# Altium footprint library board.PcbLib: 31 footprints (part 2 of 2)
Each footprint in its own frame and in the unit in brackets; x right, y up, seen from the top. Pads: shape width x height; smd on the part's side, far side on the other; paste and mask are expansions set on the pad; w line width, h text height; cw(c..) or ccw(c..) is an arc to the next point about the centre after c.
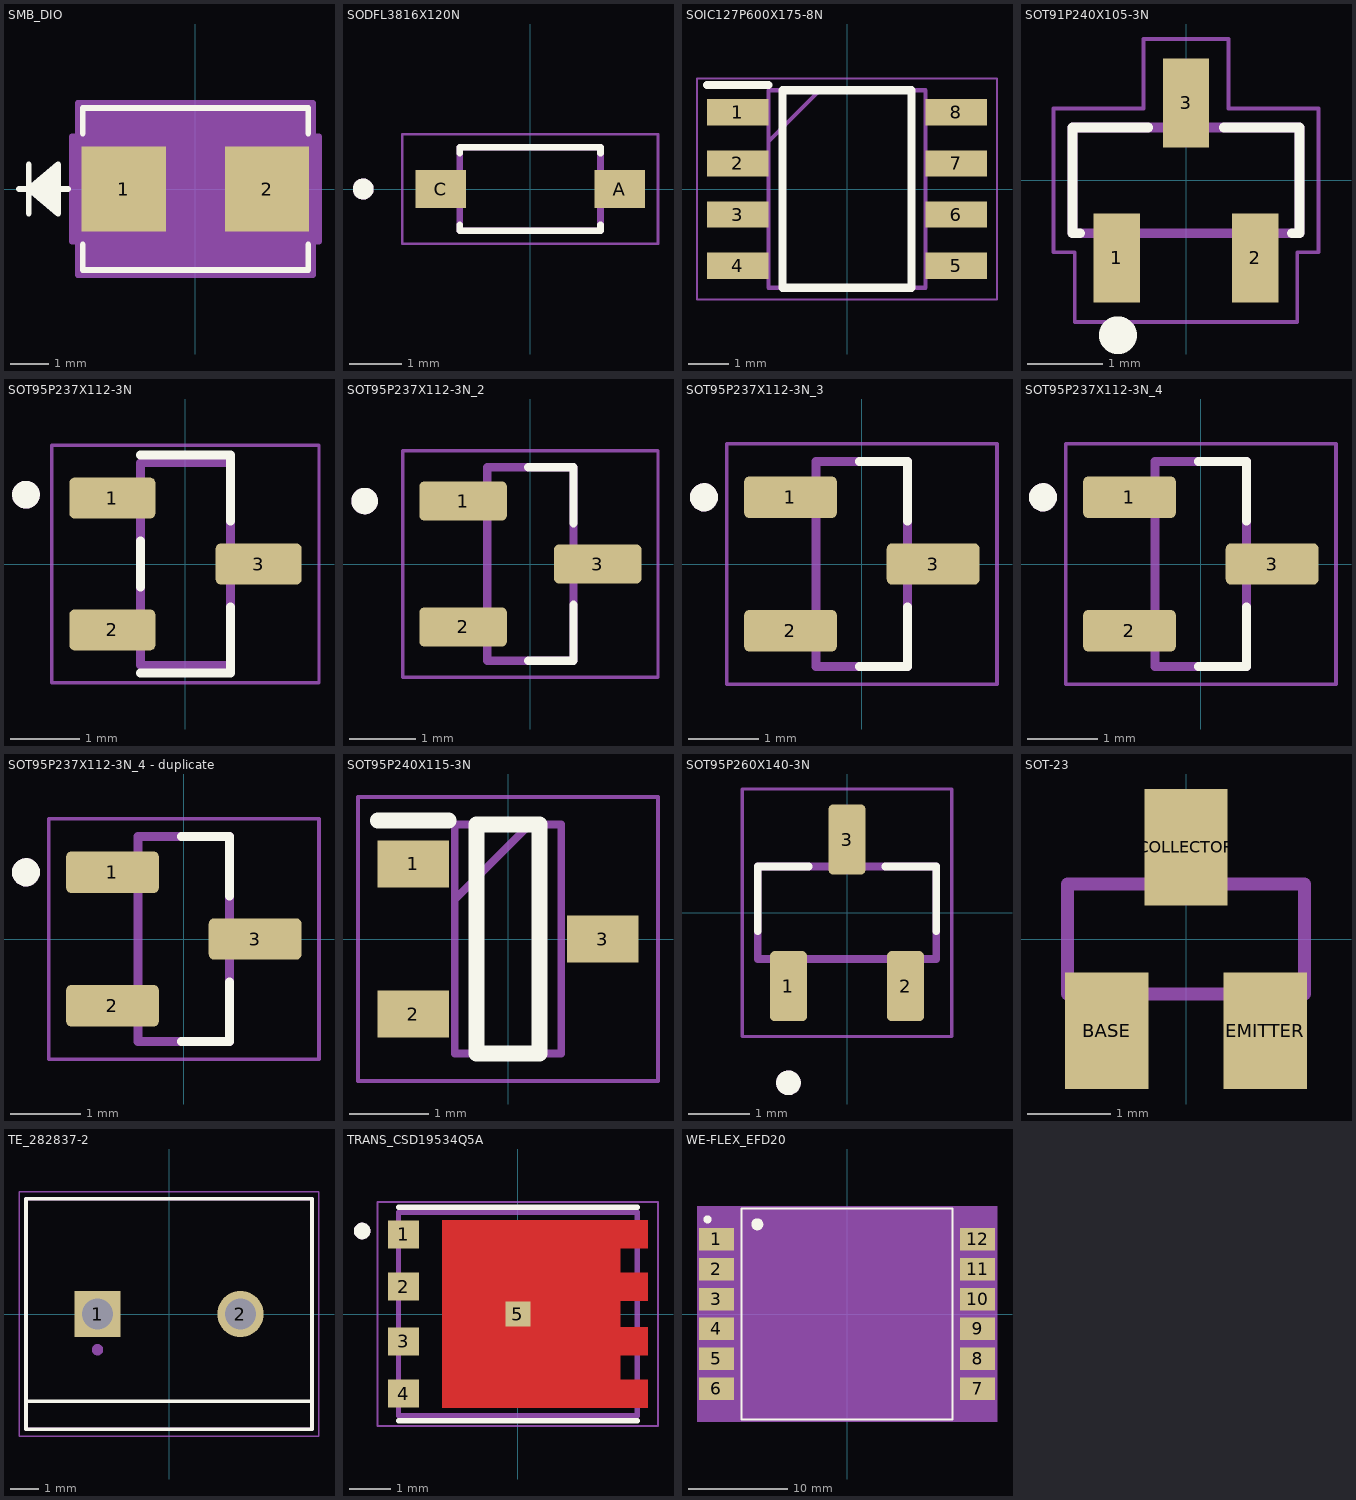
[diagram p1: the footprints below, top view; thin cyan lines are the x and y axes]

## SMB_DIO [mm]
pads (2):
  rect 2.18x2.21 smd paste+0 mask+0: 1(-1.857,0) 2(1.857,0)
Top Overlay:
  lines w0.152: -4.573,0 -3.303,0 ; -4.319,-0.635 -4.319,0.635 ; -3.557,-0.508 -4.319,0 ; -3.557,-0.381 -4.319,0 ; -3.557,-0.254 -4.319,0 ; -3.557,-0.127 -4.319,0 ; -3.557,0.127 -4.319,0 ; -3.557,0.254 -4.319,0 ; -3.557,0.381 -4.319,0 ; -3.557,0.508 -4.319,0 ; -2.922,-1.438 -2.922,-2.097 2.922,-2.097 2.922,-1.438 ; -2.922,1.438 -2.922,2.097 2.922,2.097 2.922,1.438 ; -4.319,0 -3.557,0.635 -3.557,-0.635 -4.319,0
Mechanical 13:
  lines w0.025: -4.573,0 -3.303,0 ; -4.319,-0.635 -4.319,0.635 ; -3.557,-0.508 -4.319,0 ; -3.557,-0.381 -4.319,0 ; -3.557,-0.254 -4.319,0 ; -3.557,-0.127 -4.319,0 ; -3.557,0.127 -4.319,0 ; -3.557,0.254 -4.319,0 ; -3.557,0.381 -4.319,0 ; -3.557,0.508 -4.319,0 ; -4.319,0 -3.557,0.635 -3.557,-0.635 -4.319,0 ; -2.795,-1.97 2.795,-1.97 2.795,1.97 -2.795,1.97 -2.795,-1.97
Mechanical 15:
  region: -3.049,-1.359 -3.201,-1.359 -3.201,1.359 -3.049,1.359 -3.049,2.224 3.049,2.224 3.049,1.359 3.201,1.359 3.201,-1.359 3.049,-1.359 3.049,-2.224 -3.049,-2.224
  lines w0.152: -3.201,-1.359 -3.201,1.359 -3.049,1.359 -3.049,2.224 3.049,2.224 3.049,1.359 3.201,1.359 3.201,-1.359 3.049,-1.359 3.049,-2.224 -3.049,-2.224 -3.049,-1.359 -3.201,-1.359
3D body "SMB_DIO.step": height 2.45, standoff 0, extent -2.795,-1.97 2.795,1.97

## SODFL3816X120N [mm]
height 1.2
pads (2):
  rect 0.97x0.73 smd paste+0 mask+0.102: A(1.72,0) C(-1.72,0)
Top Overlay:
  circle w0.2: c-3.205,0 r0.1
  lines w0.127: -1.35,-0.685 -1.35,-0.8 1.35,-0.8 1.35,-0.685 ; -1.35,0.685 -1.35,0.8 1.35,0.8 1.35,0.685
Mechanical 13:
  circle w0.2: c-3.205,0 r0.1
  lines w0.127: -1.35,-0.8 1.35,-0.8 1.35,0.8 -1.35,0.8 -1.35,-0.8
Mechanical 15:
  lines w0.05: -2.455,-1.05 2.455,-1.05 2.455,1.05 -2.455,1.05 -2.455,-1.05
3D body "step_temp.STEP": height 0.97, standoff -0.03, extent -1.9,-0.762 1.9,0.838

## SOIC127P600X175-8N [mm]
pads (8):
  rect 1.528x0.65 smd: 1(-2.711,1.905) 2(-2.711,0.635) 3(-2.711,-0.635) 4(-2.711,-1.905) 5(2.711,-1.905) 6(2.711,-0.635) 7(2.711,0.635) 8(2.711,1.905)
Top Overlay:
  lines w0.2: -3.475,2.58 -1.948,2.58 ; -1.598,-2.452 1.598,-2.452 1.598,2.452 -1.598,2.452 -1.598,-2.452
Mechanical 15:
  lines w0.1: -1.948,1.182 -0.678,2.452 ; -1.948,-2.452 1.948,-2.452 1.948,2.452 -1.948,2.452 -1.948,-2.452
Mechanical 20:
  lines w0.05: -3.725,-2.75 3.725,-2.75 3.725,2.75 -3.725,2.75 -3.725,-2.75
3D body "UCC28C43QDRQ1.STEP": height 1.75, standoff 0, extent -3.122,-2.452 2.868,2.452

## SOT91P240X105-3N [mm]
pads (3):
  rect 0.61x1.18 smd paste+0 mask+0.102: 1(-0.915,-1.025) 2(0.915,-1.025) 3(0,1.025)
Top Overlay:
  circle w0.4: c-0.9,-2.046 r0.05
  lines w0.127: -1.4,-0.7 -1.5,-0.7 -1.5,0.7 -0.5,0.7 ; 0.5,0.7 1.5,0.7 1.5,-0.7 1.4,-0.7
Mechanical 13:
  lines w0.127: -1.5,-0.7 1.5,-0.7 1.5,0.7 -1.5,0.7 -1.5,-0.7
Mechanical 15:
  lines w0.05: -1.75,-0.95 -1.47,-0.95 -1.47,-1.87 1.47,-1.87 1.47,-0.95 1.75,-0.95 1.75,0.95 0.56,0.95 0.56,1.87 -0.56,1.87 -0.56,0.95 -1.75,0.95 -1.75,-0.95
3D body "step_temp.STEP": height 1.14, standoff 0, extent -1.45,-1.2 1.45,1.2

## SOT95P237X112-3N [mm]
pads (3):
  rrect25% 1.24x0.59 smd paste+0 mask+0.102: 1(-1.055,0.95) 2(-1.055,-0.95) 3(1.055,0)
Top Overlay:
  circle w0.2: c-2.3,1 r0.1
  lines w0.127: -0.65,-1.57 0.65,-1.57 0.65,-0.615 ; -0.65,-0.33 -0.65,0.33 ; -0.65,1.57 0.65,1.57 0.65,0.615
Mechanical 13:
  circle w0.2: c-2.3,1 r0.1
  lines w0.127: -0.65,-1.46 -0.65,1.46 0.65,1.46 0.65,-1.46 -0.65,-1.46
Mechanical 15:
  lines w0.05: -1.925,-1.71 1.925,-1.71 1.925,1.71 -1.925,1.71 -1.925,-1.71
3D body "step_temp.STEP": height 1.12, standoff 0, extent -1.185,-1.46 1.185,1.46

## SOT95P237X112-3N_2 [mm]
pads (3):
  rrect25% 1.32x0.59 smd paste+0 mask+0.102: 1(-1.015,0.95) 2(-1.015,-0.95) 3(1.015,0)
Top Overlay:
  circle w0.2: c-2.5,0.95 r0.1
  lines w0.127: -0.035,-1.46 0.65,-1.46 0.65,-0.615 ; -0.035,1.46 0.65,1.46 0.65,0.615
Mechanical 13:
  circle w0.2: c-2.5,0.95 r0.1
  lines w0.127: -0.65,-1.46 0.65,-1.46 0.65,1.46 -0.65,1.46 -0.65,-1.46
Mechanical 15:
  lines w0.05: -1.925,-1.71 1.925,-1.71 1.925,1.71 -1.925,1.71 -1.925,-1.71
3D body "step_temp.STEP": height 1.15, standoff 0, extent -1.185,-1.46 1.185,1.46

## SOT95P237X112-3N_3 [mm]
pads (3):
  rrect25% 1.32x0.59 smd: 1(-1.015,0.95) 2(-1.015,-0.95) 3(1.015,0)
Top Overlay:
  circle w0.2: c-2.246,0.95 r0.1
  lines w0.127: -0.035,-1.46 0.65,-1.46 0.65,-0.615 ; -0.035,1.46 0.65,1.46 0.65,0.615
Mechanical 13:
  circle w0.2: c-2.246,0.95 r0.1
  lines w0.127: -0.65,-1.46 0.65,-1.46 0.65,1.46 -0.65,1.46 -0.65,-1.46
Mechanical 15:
  lines w0.05: -1.925,-1.71 1.925,-1.71 1.925,1.71 -1.925,1.71 -1.925,-1.71
3D body "step_temp.STEP": height 1.12, standoff 0, extent -1.188,-1.46 1.188,1.46

## SOT95P237X112-3N_4 [mm]
pads (3):
  rrect25% 1.32x0.59 smd: 1(-1.015,0.95) 2(-1.015,-0.95) 3(1.015,0)
Top Overlay:
  circle w0.2: c-2.246,0.95 r0.1
  lines w0.127: -0.035,-1.46 0.65,-1.46 0.65,-0.615 ; -0.035,1.46 0.65,1.46 0.65,0.615
Mechanical 13:
  circle w0.2: c-2.246,0.95 r0.1
  lines w0.127: -0.65,-1.46 0.65,-1.46 0.65,1.46 -0.65,1.46 -0.65,-1.46
Mechanical 15:
  lines w0.05: -1.925,-1.71 1.925,-1.71 1.925,1.71 -1.925,1.71 -1.925,-1.71
3D body "DIO_MMBZ1_ROM.step": height 1.15, standoff 0, extent -1.422,-1.448 1.168,1.448

## SOT95P237X112-3N_4 - duplicate [mm]
pads (3):
  rrect25% 1.32x0.59 smd: 1(-1.015,0.95) 2(-1.015,-0.95) 3(1.015,0)
Top Overlay:
  circle w0.2: c-2.246,0.95 r0.1
  lines w0.127: -0.035,-1.46 0.65,-1.46 0.65,-0.615 ; -0.035,1.46 0.65,1.46 0.65,0.615
Mechanical 13:
  circle w0.2: c-2.246,0.95 r0.1
  lines w0.127: -0.65,-1.46 0.65,-1.46 0.65,1.46 -0.65,1.46 -0.65,-1.46
Mechanical 15:
  lines w0.05: -1.925,-1.71 1.925,-1.71 1.925,1.71 -1.925,1.71 -1.925,-1.71
3D body "DIO_MMBZ1_ROM.step": height 1.15, standoff 0, extent -1.295,-1.448 1.295,1.448

## SOT95P240X115-3N [mm]
pads (3):
  rect 0.9x0.6 smd: 1(-1.2,0.95) 2(-1.2,-0.95) 3(1.2,0)
Top Overlay:
  lines w0.2: -1.65,1.5 -0.75,1.5 ; -0.4,-1.45 0.4,-1.45 0.4,1.45 -0.4,1.45 -0.4,-1.45
Mechanical 15:
  lines w0.1: -0.675,0.5 0.275,1.45 ; -0.675,-1.45 0.675,-1.45 0.675,1.45 -0.675,1.45 -0.675,-1.45
Mechanical 20:
  lines w0.05: -1.9,-1.8 1.9,-1.8 1.9,1.8 -1.9,1.8 -1.9,-1.8
3D body "DIO_MMBZ1_ROM.step": height 1.15, standoff 0, extent -1.295,-1.448 1.295,1.448

## SOT95P260X140-3N [mm]
height 1.4
pads (3):
  rrect25% 0.6x1.14 smd paste+0 mask+0.102: 1(-0.95,-1.19) 2(0.95,-1.19) 3(0,1.19)
Top Overlay:
  circle w0.2: c-0.95,-2.76 r0.1
  lines w0.127: -1.45,-0.3 -1.45,0.75 -0.62,0.75 ; 0.62,0.75 1.45,0.75 1.45,-0.3
Mechanical 13:
  circle w0.2: c-0.95,-2.76 r0.1
  lines w0.127: -1.45,-0.75 -1.45,0.75 1.45,0.75 1.45,-0.75 -1.45,-0.75
Mechanical 15:
  lines w0.05: -1.7,-2.01 1.7,-2.01 1.7,2.01 -1.7,2.01 -1.7,-2.01
3D body "step_temp.STEP": height 1.28, standoff -0.02, extent -1.52,-1.524 1.52,1.076

## SOT-23 [mm]
pads (3):
  rect 1x1.4 smd paste+0 mask+0.102: BASE(-0.95,-1.1) COLLECTOR(0,1.1) EMITTER(0.95,-1.1)
Mechanical 13:
  region: -0.711,-1.298 -1.171,-1.298 -1.171,-0.711 -0.711,-0.711
  region: 1.168,-1.296 0.711,-1.296 0.711,-0.711 1.168,-0.711
  region: 0.229,0.712 -0.229,0.712 -0.229,1.295 0.229,1.295
  lines w0.152: -1.422,-0.66 -1.422,0.66 1.422,0.66 1.422,-0.66 -1.422,-0.66
3D body "step_temp.STEP": height 1.11, standoff 0, extent -1.45,-1.327 1.45,1.073

## TE_282837-2 [mm]
pads (2):
  rect 1.65x1.65 / inner round 1.65 / far side rect 1.65x1.65 hole 1.1: 1(-2.54,0)
  round 1.65 hole 1.1: 2(2.54,0)
Top Overlay:
  lines w0.127: -5.08,-3.1 5.08,-3.1 ; -5.08,-3.1 -5.08,4.1 5.08,4.1 5.08,-3.1 ; -5.08,-3.1 -5.08,-4.1 5.08,-4.1 5.08,-3.1
Mechanical 13:
  circle w0.2: c-2.54,-1.27 r0.1
  lines w0.127: -5.08,-4.1 -5.08,4.1 5.08,4.1 5.08,-4.1 -5.08,-4.1
Mechanical 15:
  lines w0.05: -5.33,-4.35 -5.33,4.35 5.33,4.35 5.33,-4.35 -5.33,-4.35
3D body "step_temp.STEP": height 10, standoff -3.5, extent -5.68,-4.1 5.08,4.1

## TRANS_CSD19534Q5A [mm]
pads (5):
  rect 0.75x0.675 smd paste-1: 1(-2.752,1.917) 2(-2.752,0.66) 3(-2.752,-0.66) 4(-2.752,-1.917)
  rect 0.6x0.6 smd paste-1 mask+0: 5(0,0)
Top Layer:
  region: 3.127,1.58 2.472,1.58 2.472,0.998 3.127,0.998 3.127,0.323 2.472,0.323 2.472,-0.323 3.127,-0.323 3.127,-0.998 2.472,-0.998 2.472,-1.58 3.127,-1.58 3.127,-2.255 -1.823,-2.255 -1.823,2.255 3.127,2.255
Top Overlay:
  circle w0.2: c-3.75,2 r0.1
  lines w0.127: -2.875,-2.575 2.875,-2.575 ; -2.875,2.575 2.875,2.575
Top Paste:
  region: -0.18,0.31 -1.415,0.31 -1.415,1.88 -0.18,1.88
  region: 1.905,-1.88 0.32,-1.88 0.32,-0.31 1.905,-0.31
  region: -0.18,-1.88 -1.415,-1.88 -1.415,-0.31 -0.18,-0.31
  region: 1.905,0.31 0.32,0.31 0.32,1.88 1.905,1.88
  region: -2.52,1.655 -3.02,1.655 -3.02,2.155 -2.52,2.155
  region: -2.52,0.385 -3.02,0.385 -3.02,0.885 -2.52,0.885
  region: -2.52,-2.155 -3.02,-2.155 -3.02,-1.655 -2.52,-1.655
  region: -2.52,-0.885 -3.02,-0.885 -3.02,-0.385 -2.52,-0.385
  region: 3.02,1.655 2.52,1.655 2.52,2.155 3.02,2.155
  region: 3.02,0.385 2.52,0.385 2.52,0.885 3.02,0.885
  region: 3.02,-2.155 2.52,-2.155 2.52,-1.655 3.02,-1.655
  region: 3.02,-0.885 2.52,-0.885 2.52,-0.385 3.02,-0.385
Top Solder:
  region: 3.227,1.48 2.572,1.48 2.572,1.098 3.227,1.098 3.227,0.222 2.572,0.222 2.572,-0.222 3.227,-0.222 3.227,-1.098 2.572,-1.098 2.572,-1.48 3.227,-1.48 3.227,-2.355 -1.923,-2.355 -1.923,2.355 3.227,2.355
Mechanical 13:
  circle w0.2: c-3.75,2 r0.1
  lines w0.127: -2.875,-2.45 -2.875,2.45 2.875,2.45 2.875,-2.45 -2.875,-2.45
Mechanical 15:
  lines w0.05: -3.377,-2.7 3.377,-2.7 3.377,2.7 -3.377,2.7 -3.377,-2.7
3D body "CSD19534Q5A--3DModel-STEP-56544.STEP": height 1.1, standoff 0, extent -3,-2.45 3,2.45

## WE-FLEX_EFD20 [mm]
pads (12):
  rect 3.5x2.25 smd paste+0 mask+0.102: 1(-13.1,7.5) 2(-13.1,4.5) 3(-13.1,1.5) 4(-13.1,-1.5) 5(-13.1,-4.5) 6(-13.1,-7.5) 7(13.1,-7.5) 8(13.1,-4.5) 9(13.1,-1.5) 10(13.1,1.5) 11(13.1,4.5) 12(13.1,7.5)
Top Overlay:
  circle w0.4: c-14,9.5 r0.2
  circle w0.6: c-9,9 r0.3
  lines w0.2: -10.6,-10.6 10.6,-10.6 10.6,10.6 -10.6,10.6 -10.6,-10.6
Mechanical 13:
  lines w0.1: -10.5,-7.85 -14.75,-7.85 -14.75,-7.15 -10.5,-7.15 ; -10.5,-4.85 -14.75,-4.85 -14.75,-4.15 -10.5,-4.15 ; -10.5,-1.85 -14.75,-1.85 -14.75,-1.15 -10.5,-1.15 ; -10.5,4.15 -14.75,4.15 -14.75,4.85 -10.5,4.85 ; -10.5,7.15 -14.75,7.15 -14.75,7.85 -10.5,7.85 ; 10.5,-7.85 14.75,-7.85 14.75,-7.15 10.5,-7.15 ; 10.5,-4.85 14.75,-4.85 14.75,-4.15 10.5,-4.15 ; 10.5,-1.85 14.75,-1.85 14.75,-1.15 10.5,-1.15 ; 10.5,1.15 14.75,1.15 14.75,1.85 10.5,1.85 ; 10.5,4.15 14.75,4.15 14.75,4.85 10.5,4.85 ; 10.5,7.15 14.75,7.15 14.75,7.85 10.5,7.85 ; -10.5,1.15 -10.5,1.85 ; -10.5,1.15 -10.5,-10.5 10.5,-10.5 10.5,10.5 -10.5,10.5 -10.5,1.85 ; -10.5,1.15 -14.75,1.15 -14.75,1.85 -10.5,1.85
Mechanical 15:
  region: 15.05,-10.8 -15.05,-10.8 -15.05,10.8 15.05,10.8
3D body "step_temp.STEP": height 10.8, standoff 0, extent -15.113,-10.373 14.387,10.627